# Altium footprint library SamacSys.PcbLib: 1008 footprints (part 45 of 63)
Each footprint in its own frame and in the unit in brackets; x right, y up, seen from the top. Pads: shape width x height; smd on the part's side, far side on the other; paste and mask are expansions set on the pad; w line width, h text height; cw(c..) or ccw(c..) is an arc to the next point about the centre after c.
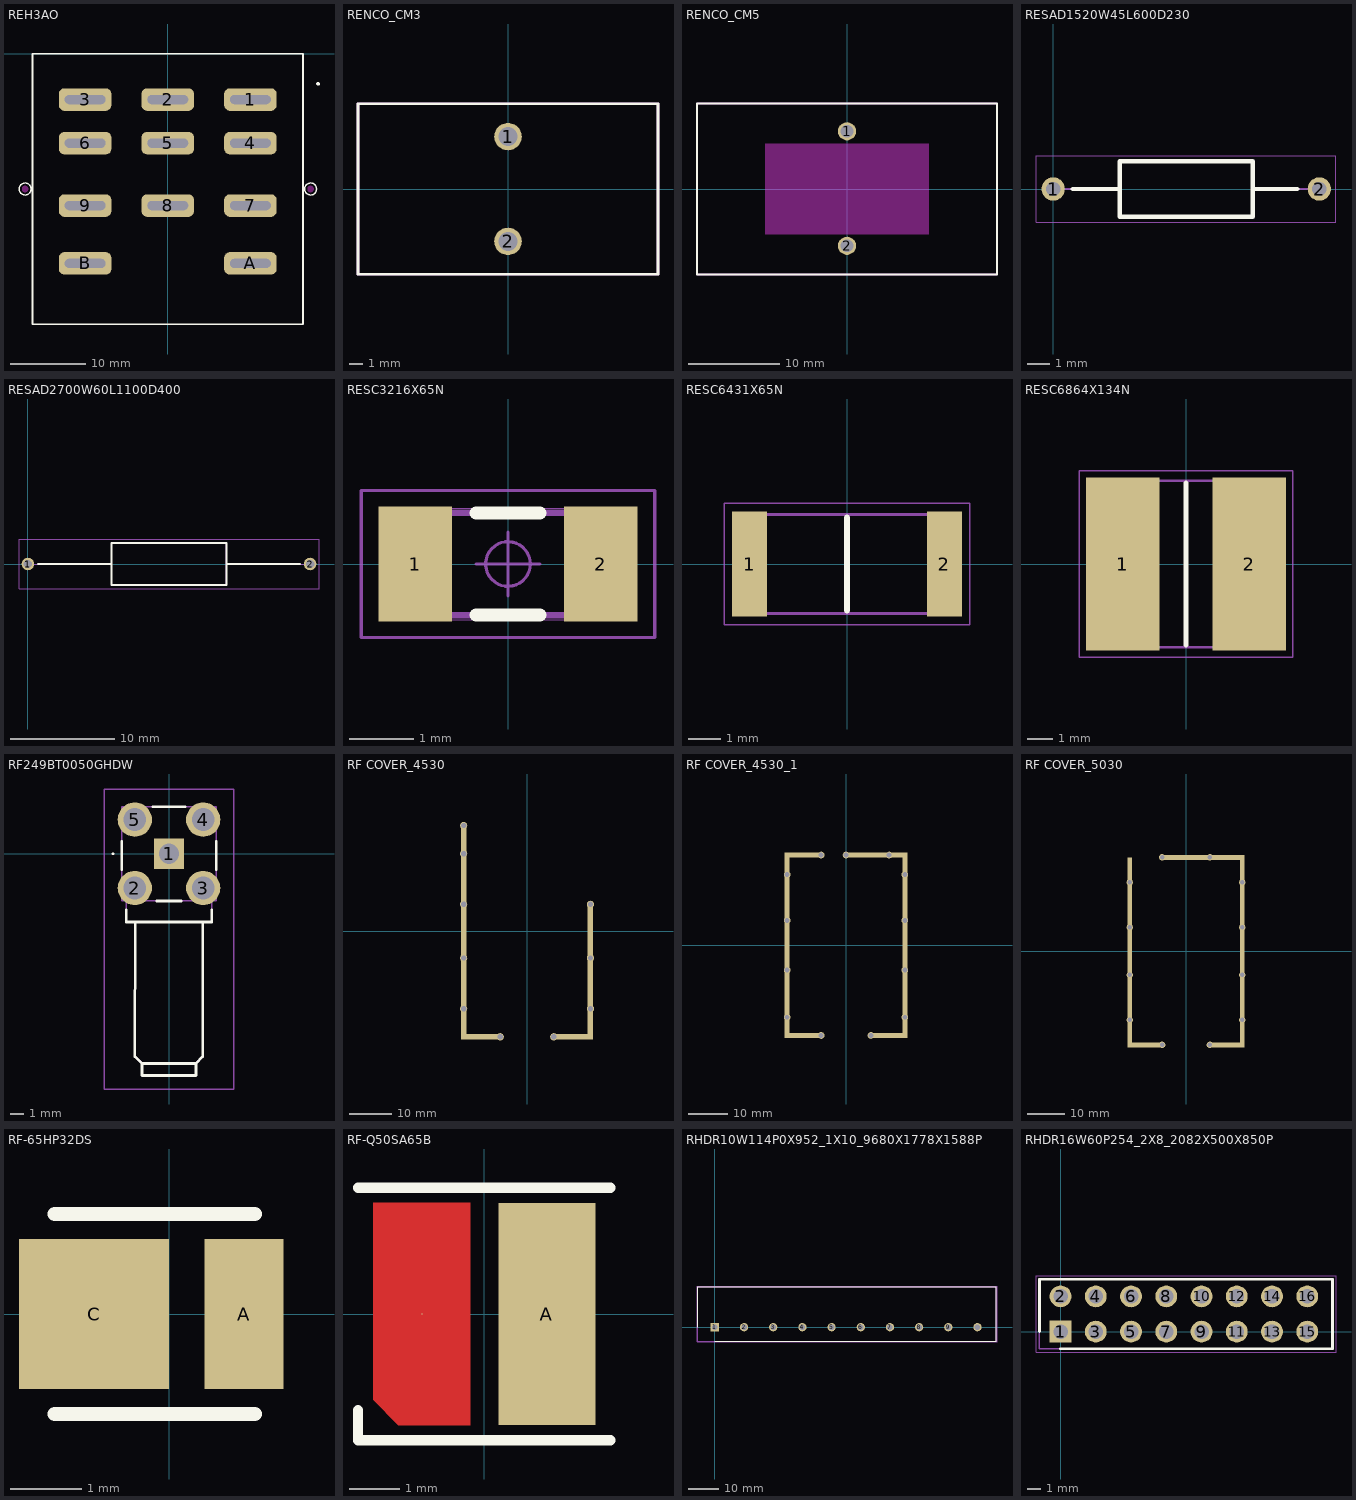
[diagram p44: the footprints below, top view; thin cyan lines are the x and y axes]

## REH3AO [mm]
pads (11):
  rrect50% 7x3 hole 1.2 slot 5.4 at 0 deg: 1(11,-6.1) 2(0,-6.1) 3(-11,-6.1) 4(11,-11.9) 5(0,-11.9) 6(-11,-11.9) 7(11,-20.2) 8(0,-20.2) 9(-11,-20.2) A(11,-27.9) B(-11,-27.9)
Top Overlay:
  circle w0.2: c-19,-18 r0.8
  circle w0.25: c20,-4 r0.125
  circle w0.2: c19,-18 r0.8
  lines w0.254: -18,-36 18,-36 18,0 -18,0 -18,-36
Keep-Out Layer:
  board cut-out: -19.4,-18 -19.4,-18.08 -19.339,-18.227 -19.227,-18.339 -19.08,-18.4 -19,-18.4 -18.92,-18.4 -18.773,-18.339 -18.661,-18.227 -18.6,-18.08 -18.6,-18 -18.6,-17.92 -18.661,-17.773 -18.773,-17.661 -18.92,-17.6 -19,-17.6 -19.08,-17.6 -19.227,-17.661 -19.339,-17.773 -19.4,-17.92
  board cut-out: 18.6,-18 18.6,-18.08 18.661,-18.227 18.773,-18.339 18.92,-18.4 19,-18.4 19.08,-18.4 19.227,-18.339 19.339,-18.227 19.4,-18.08 19.4,-18 19.4,-17.92 19.339,-17.773 19.227,-17.661 19.08,-17.6 19,-17.6 18.92,-17.6 18.773,-17.661 18.661,-17.773 18.6,-17.92
3D body: height 47, standoff 0, extent -18,-36 18,0

## RENCO_CM3 [mm]
pads (2):
  round 2 hole 1.4: 1(0,3.81) 2(0,-3.81)
Top Overlay:
  lines w0.2: -10.9,-6.2 10.9,-6.2 10.9,6.2 -10.9,6.2 -10.9,-6.2
Assembly:
  lines w0.2: -10.9,-6.2 -10.9,6.2 10.9,6.2 10.9,-6.2 -10.9,-6.2

## RENCO_CM5 [mm]
pads (2):
  round 2 hole 1.4: 1(0,6.35) 2(0,-6.25)
Top Overlay:
  lines w0.2: -16.5,-9.4 -16.5,9.4 16.5,9.4 16.5,-9.4 -16.5,-9.4
Keep-Out Layer:
  board cut-out: -9,-5 -9,5 9,5 9,-5
Assembly:
  lines w0.2: -16.5,-9.4 16.5,-9.4 16.5,9.4 -16.5,9.4 -16.5,-9.4

## RESAD1520W45L600D230 [mm]
pads (2):
  round 1.05 hole 0.65: 1(0,0) 2(12,0)
Top Overlay:
  lines w0.2: 0.875,0 3,0 ; 9,0 11,0 ; 3,-1.25 3,1.25 9,1.25 9,-1.25 3,-1.25
Assembly:
  lines w0.1: 0,0 3,0 ; 3,-1.25 3,1.25 9,1.25 9,-1.25 3.25,-1.25 ; 9,0 12,0
Countryard:
  lines w0.05: -0.775,-1.5 -0.775,1.5 12.75,1.5 12.75,-1.5 -0.775,-1.5
3D body "CF25-75K-J-TB-048-62.stp": height 2.8, standoff -2.8, extent -1.825,-1.28 13.825,1.5

## RESAD2700W60L1100D400 [mm]
pads (2):
  round 1.2 hole 0.8: 1(0,0) 2(27,0)
Top Overlay:
  lines w0.2: 0.95,0 8,0 ; 19,0 26.05,0 ; 8,-2 8,2 19,2 19,-2 8,-2
Assembly:
  lines w0.1: 0,0 8,0 ; 19,0 27,0 ; 8,-2 8,2 19,2 19,-2 8,-2
Countryard:
  lines w0.05: -0.85,-2.35 -0.85,2.35 27.85,2.35 27.85,-2.35 -0.85,-2.35
3D body "CF100-3K3-J-TB-070-62.stp": height 4.5, standoff -4.5, extent -0.3,-2.238 27.3,2.238

## RESC3216X65N [mm]
pads (2):
  rect 1.15x1.8 smd: 1(-1.45,0) 2(1.45,0)
Top Overlay:
  lines w0.2: -0.5,-0.8 0.5,-0.8 ; -0.5,0.8 0.5,0.8
Assembly:
  lines w0.1: -1.6,-0.8 -1.6,0.8 1.6,0.8 1.6,-0.8 -1.6,-0.8
Countryard:
  circle w0.05: c0,0 r0.35
  lines w0.001: -1.675,-0.875 -1.675,0.875 1.675,0.875 1.675,-0.875 -1.675,-0.875
  lines w0.05: -0.5,0 0.5,0 ; 0,-0.5 0,0.5 ; -2.3,-1.15 -2.3,1.15 2.3,1.15 2.3,-1.15 -2.3,-1.15
3D body "MFU1206FF00500P100.stp": height 0.65, standoff 0, extent -1.575,-0.8 1.575,0.8

## RESC6431X65N [mm]
pads (2):
  rect 1.1x3.3 smd: 1(-3.05,0) 2(3.05,0)
Top Overlay:
  lines w0.2: 0,-1.45 0,1.45
Assembly:
  lines w0.1: -3.175,-1.55 -3.175,1.55 3.175,1.55 3.175,-1.55 -3.175,-1.55
Countryard:
  lines w0.05: -3.85,-1.9 -3.85,1.9 3.85,1.9 3.85,-1.9 -3.85,-1.9
3D body "RC2512FK-072KL.stp": height 0.65, standoff 0, extent -3.175,-1.55 3.175,1.55

## RESC6864X134N [mm]
pads (2):
  rect 2.85x6.7 smd: 1(-2.45,0) 2(2.45,0)
Top Overlay:
  lines w0.2: 0,-3.125 0,3.125
Assembly:
  lines w0.1: -3.405,-3.225 -3.405,3.225 3.405,3.225 3.405,-3.225 -3.405,-3.225
Countryard:
  lines w0.05: -4.125,-3.6 -4.125,3.6 4.125,3.6 4.125,-3.6 -4.125,-3.6
3D body "CSS2725FT1L00.stp": height 1.09, standoff 0, extent -3.404,-3.226 3.406,3.224

## RF249BT0050GHDW [mm]
pads (5):
  rect 2.25x2.25 hole 1.5: 1(0,0)
  round 2.55 hole 1.7: 2(-2.54,-2.54) 3(2.54,-2.54) 4(2.54,2.54) 5(-2.54,2.54)
Top Overlay:
  lines w0.1: -4.2,0 cw(c-4.15,0) -4.1,0 cw(c-4.15,0) -4.2,0
  lines w0.2: -3.5,-1.17 -3.5,0.93 ; -3.175,-4.17 -3.175,-5.07 3.175,-5.07 3.175,-4.17 ; -2.5,-5.07 -2.54,-15.07 -2,-15.57 ; -1.2,3.5 1.2,3.5 ; -0.9,-3.5 0.9,-3.5 ; 2.5,-5.07 2.5,-15.07 2,-15.57 ; 3.5,-1.17 3.5,0.93 ; -2,-15.57 -2,-16.47 2,-16.47 2,-15.57 ; -2,-15.57 2,-15.57
Assembly:
  lines w0.1: -3.175,-3.5 -3.175,-5.07 3.175,-5.07 3.175,-3.5 ; -2.5,-5.07 -2.5,-15.07 -2,-15.57 ; 2.5,-5.07 2.5,-15.07 2,-15.57 ; -2,-15.57 2,-15.57 ; -2,-15.57 -2,-16.47 2,-16.47 2,-15.57 ; -3.5,-3.5 -3.5,3.5 3.5,3.5 3.5,-3.5 -3.5,-3.5
Countryard:
  lines w0.1: -4.815,-17.47 -4.815,4.815 4.815,4.815 4.815,-17.47 -4.815,-17.47
3D body "RF2-49B-T-00-50-G-HDW.stp": height 12.08, standoff -2.16, extent -5.1,-16.43 5.1,3.54

## RF COVER_4530 [mm] "RF COVER"
pads (14):
  round 1.72 hole 1.25: 1(-15,-18.35) 1(-15,-6.35) 1(-15,6.35) 1(-15,18.35) 1(-15,25) 1(-6.35,-25) 1(6.35,-25) 1(15,-18.35) 1(15,-6.35) 1(15,6.35)
  rect 1.3x50 smd: 1(-15,0)
  rect 9.1x1.3 smd: 1(-11.1,-25) 1(11.1,-25)
  rect 1.3x32 smd: 1(15,-9.5)

## RF COVER_4530_1 [mm] "RF COVER"
pads (19):
  round 1.72 hole 1.25: 1(-15,-18.35) 1(-15,-6.35) 1(-15,6.35) 1(-15,18) 1(-6.35,-23) 1(-6.35,23) 1(0,23) 1(6.35,-23) 1(11,23) 1(15,-18.35) 1(15,-6.35) 1(15,6.35) 1(15,18)
  rect 1.3x46 smd: 1(-15,0)
  rect 9.1x1.3 smd: 1(-11.1,-23) 1(-11.1,23) 1(11.1,-23)
  rect 15.5x1.3 smd: 1(7.9,23)
  rect 1.3x47 smd: 1(15,0)

## RF COVER_5030 [mm] "RF COVER"
pads (21):
  round 1.72 hole 1.25: 1(-15,-18.35) 1(-15,-6.35) 1(-15,6.35) 1(-15,6.35) 1(-15,18.35) 1(-15,18.35) 1(-6.35,-25) 1(-6.35,25) 1(6.35,-25) 1(6.35,25) 1(15,-18.35) 1(15,-6.35) 1(15,6.35) 1(15,6.35) 1(15,18.35) 1(15,18.35)
  rect 1.3x50 smd: 1(-15,0) 1(15,0)
  rect 9.1x1.3 smd: 1(-11.1,-25) 1(11.1,-25)
  rect 22x1.3 smd: 1(4.6,25)

## RF-65HP32DS [mm]
height 0.7
pads (2):
  rect 1.1x2.1 smd: A(1.05,0)
  rect 2.1x2.1 smd: C(-1.05,0)
Top Overlay:
  lines w0.2: -1.6,-1.4 1.2,-1.4 ; -1.6,1.4 1.2,1.4

## RF-Q50SA65B [mm]
height 0.7
pads (2):
  rect 1.92x4.4 smd: A(1.24,0)
  round 0.025 smd: C(-1.24,0)
Top Layer:
  region: -2.2,-1.7 -1.7,-2.2 -0.28,-2.2 -0.28,2.2 -2.2,2.2
Top Overlay:
  lines w0.2: -2.5,-1.9 -2.5,-2.5 2.5,-2.5 ; -2.5,2.5 2.5,2.5

## RHDR10W114P0X952_1X10_9680X1778X1588P [mm]
pads (10):
  rect 2.7x2.7 hole 1.8: 1(0,0)
  round 2.7 hole 1.8: 2(9.525,0) 3(19.05,0) 4(28.575,0) 5(38.1,0) 6(47.625,0) 7(57.15,0) 8(66.675,0) 9(76.2,0) 10(85.725,0)
Top Overlay:
  lines w0.2: -5.588,0 -5.588,13.208 91.847,13.208 91.847,-4.572 0,-4.572
Assembly:
  lines w0.1: -5.588,-4.572 -5.588,13.208 91.847,13.208 91.847,-4.572 -5.588,-4.572
Countryard:
  lines w0.05: -5.838,-4.822 -5.838,13.458 92.097,13.458 92.097,-4.822 -5.838,-4.822
3D body "c-3-1437653-5-p-3d.stp": height 15.96, standoff -4.99, extent -5.6,-4.6 91.199,13.18

## RHDR16W60P254_2X8_2082X500X850P [mm]
pads (16):
  rect 1.575x1.575 hole 1.05: 1(0,0)
  round 1.575 hole 1.05: 2(0,2.54) 3(2.54,0) 4(2.54,2.54) 5(5.08,0) 6(5.08,2.54) 7(7.62,0) 8(7.62,2.54) 9(10.16,0) 10(10.16,2.54) 11(12.7,0) 12(12.7,2.54) 13(15.24,0) 14(15.24,2.54) 15(17.78,0) 16(17.78,2.54)
Top Overlay:
  lines w0.2: -1.52,0 -1.52,3.77 19.6,3.77 19.6,-1.23 0,-1.23
Assembly:
  lines w0.1: -1.52,-1.23 -1.52,3.77 19.6,3.77 19.6,-1.23 -1.52,-1.23
Countryard:
  lines w0.05: -1.77,-1.48 -1.77,4.02 19.85,4.02 19.85,-1.48 -1.77,-1.48
3D body "DS1023-2_8S21.stp": height 8.5, standoff -3, extent -1.52,-1.23 19.3,3.77